# Altium schematic symbol library Altium_Library.SchLib: 822 symbols (part 12 of 17)
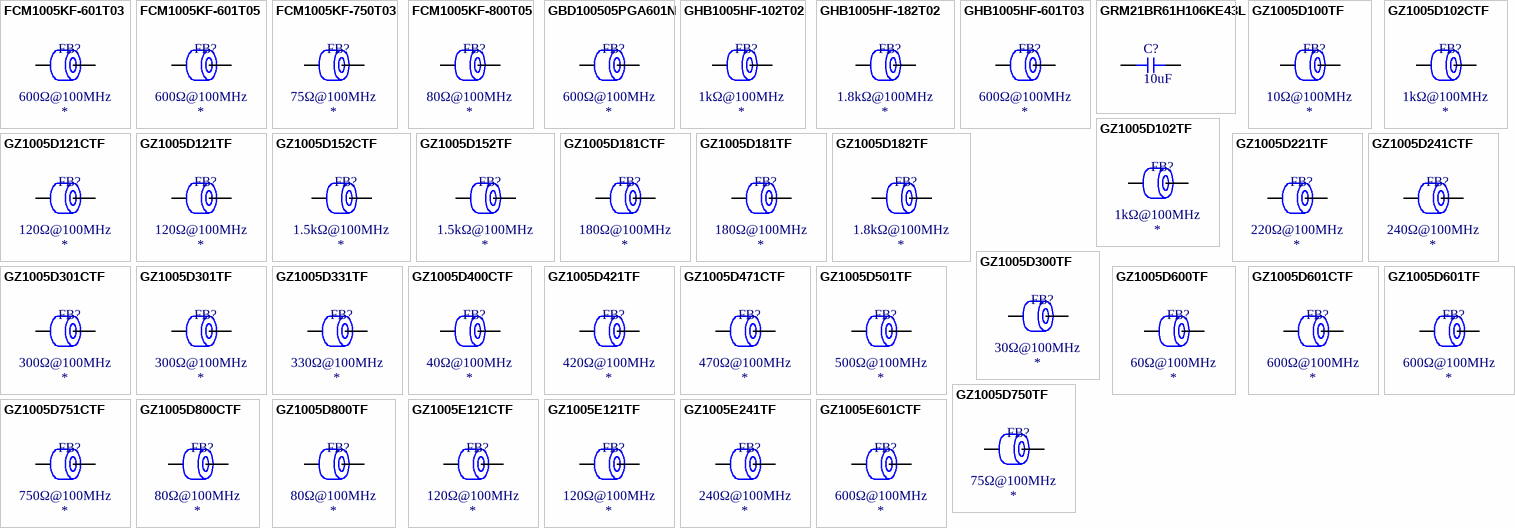
[diagram p31: symbols FCM1005KF-601T03 to GZ1005E601CTF]

## GZ1005D102TF
designator FB?  Impedance @ Frequency: 1kΩ@100MHz
Ferrite, 1kΩ@100MHz, ±25%, 1.2Ω, 100mA, SMD 0402; Manufacturer: Sunlord; Manufacturer Part Number: GZ1005D102TF; Package Size: 0402; JLCPCB Basic Part: No; JLCPCB Part Number: C32472; Supplier 1: LCSC; Category: Ferrite Beads; Supplier Part Number 1: C32472; Tolerance: ±25%; Rated Current: 100mA; DC Resistance: 1.2Ω; RoHS: Yes; ComponentLink1Description: Datasheet; ComponentLink1URL: https://wmsc.lcsc.com/wmsc/upload/file/pdf/v2/lcsc/2310301640_Sunlord-GZ1005D102TF_C32472.pdf; ComponentLink2Description: JLCPCB Part URL; ComponentLink2URL: https://jlcpcb.com/partdetail/C32472; ComponentLink3Description: LCSC Part URL; ComponentLink3URL: https://lcsc.com/product-detail/Ferrite-Beads_Sunlord-Sunlord-GZ1005D102TF_C32472.html
footprint FB-0402 (0402 (1005M) Ferrite)
pins: 1, 2

## GZ1005D121CTF
designator FB?  Impedance @ Frequency: 120Ω@100MHz
Ferrite, 120Ω@100MHz, ±25%, 180mΩ, 400mA, SMD 0402; Manufacturer: Sunlord; Manufacturer Part Number: GZ1005D121CTF; Package Size: 0402; JLCPCB Basic Part: No; JLCPCB Part Number: C92620; Supplier 1: LCSC; Category: Ferrite Beads; Supplier Part Number 1: C92620; Tolerance: ±25%; Rated Current: 400mA; DC Resistance: 180mΩ; RoHS: Yes; ComponentLink1Description: Datasheet; ComponentLink1URL: https://wmsc.lcsc.com/wmsc/upload/file/pdf/v2/lcsc/2310301640_Sunlord-GZ1005D121CTF_C92620.pdf; ComponentLink2Description: JLCPCB Part URL; ComponentLink2URL: https://jlcpcb.com/partdetail/C92620; ComponentLink3Description: LCSC Part URL; ComponentLink3URL: https://lcsc.com/product-detail/Ferrite-Beads_Sunlord-Sunlord-GZ1005D121CTF_C92620.html
footprint FB-0402 (0402 (1005M) Ferrite)
pins: 1, 2

## GZ1005D121TF
designator FB?  Impedance @ Frequency: 120Ω@100MHz
Ferrite, 120Ω@100MHz, ±25%, 400mΩ, 200mA, SMD 0402; Manufacturer: Sunlord; Manufacturer Part Number: GZ1005D121TF; Package Size: 0402; JLCPCB Basic Part: No; JLCPCB Part Number: C38480; Supplier 1: LCSC; Category: Ferrite Beads; Supplier Part Number 1: C38480; Tolerance: ±25%; Rated Current: 200mA; DC Resistance: 400mΩ; RoHS: Yes; ComponentLink1Description: Datasheet; ComponentLink1URL: https://wmsc.lcsc.com/wmsc/upload/file/pdf/v2/lcsc/2310301640_Sunlord-GZ1005D121TF_C38480.pdf; ComponentLink2Description: JLCPCB Part URL; ComponentLink2URL: https://jlcpcb.com/partdetail/C38480; ComponentLink3Description: LCSC Part URL; ComponentLink3URL: https://lcsc.com/product-detail/Ferrite-Beads_Sunlord-Sunlord-GZ1005D121TF_C38480.html
footprint FB-0402 (0402 (1005M) Ferrite)
pins: 1, 2

## GZ1005D152CTF
designator FB?  Impedance @ Frequency: 1.5kΩ@100MHz
Ferrite, 1.5kΩ@100MHz, ±25%, 1.15Ω, 100mA, SMD 0402; Manufacturer: Sunlord; Manufacturer Part Number: GZ1005D152CTF; Package Size: 0402; JLCPCB Basic Part: No; JLCPCB Part Number: C96680; Supplier 1: LCSC; Category: Ferrite Beads; Supplier Part Number 1: C96680; Tolerance: ±25%; Rated Current: 100mA; DC Resistance: 1.15Ω; RoHS: Yes; ComponentLink1Description: Datasheet; ComponentLink1URL: https://wmsc.lcsc.com/wmsc/upload/file/pdf/v2/lcsc/2310301640_Sunlord-GZ1005D152CTF_C96680.pdf; ComponentLink2Description: JLCPCB Part URL; ComponentLink2URL: https://jlcpcb.com/partdetail/C96680; ComponentLink3Description: LCSC Part URL; ComponentLink3URL: https://lcsc.com/product-detail/Ferrite-Beads_Sunlord-Sunlord-GZ1005D152CTF_C96680.html
footprint FB-0402 (0402 (1005M) Ferrite)
pins: 1, 2

## GZ1005D152TF
designator FB?  Impedance @ Frequency: 1.5kΩ@100MHz
Ferrite, 1.5kΩ@100MHz, ±25%, 1.6Ω, 100mA, SMD 0402; Manufacturer: Sunlord; Manufacturer Part Number: GZ1005D152TF; Package Size: 0402; JLCPCB Basic Part: No; JLCPCB Part Number: C89920; Supplier 1: LCSC; Category: Ferrite Beads; Supplier Part Number 1: C89920; Tolerance: ±25%; Rated Current: 100mA; DC Resistance: 1.6Ω; RoHS: Yes; ComponentLink1Description: Datasheet; ComponentLink1URL: https://wmsc.lcsc.com/wmsc/upload/file/pdf/v2/lcsc/2310301640_Sunlord-GZ1005D152TF_C89920.pdf; ComponentLink2Description: JLCPCB Part URL; ComponentLink2URL: https://jlcpcb.com/partdetail/C89920; ComponentLink3Description: LCSC Part URL; ComponentLink3URL: https://lcsc.com/product-detail/Ferrite-Beads_Sunlord-Sunlord-GZ1005D152TF_C89920.html
footprint FB-0402 (0402 (1005M) Ferrite)
pins: 1, 2

## GZ1005D181CTF
designator FB?  Impedance @ Frequency: 180Ω@100MHz
Ferrite, 180Ω@100MHz, ±25%, SMD 0402; Manufacturer: Sunlord; Manufacturer Part Number: GZ1005D181CTF; Package Size: 0402; JLCPCB Basic Part: No; JLCPCB Part Number: C919150; Supplier 1: LCSC; Category: Ferrite Beads; Supplier Part Number 1: C919150; Tolerance: ±25%; RoHS: Yes; ComponentLink1Description: Datasheet; ComponentLink1URL: https://wmsc.lcsc.com/wmsc/upload/file/pdf/v2/lcsc/2310301640_Sunlord-GZ1005D181CTF_C919150.pdf; ComponentLink2Description: JLCPCB Part URL; ComponentLink2URL: https://jlcpcb.com/partdetail/C919150; ComponentLink3Description: LCSC Part URL; ComponentLink3URL: https://lcsc.com/product-detail/Ferrite-Beads_Sunlord-Sunlord-GZ1005D181CTF_C919150.html
footprint FB-0402 (0402 (1005M) Ferrite)
pins: 1, 2

## GZ1005D181TF
designator FB?  Impedance @ Frequency: 180Ω@100MHz
Ferrite, 180Ω@100MHz, ±25%, SMD 0402; Manufacturer: Sunlord; Manufacturer Part Number: GZ1005D181TF; Package Size: 0402; JLCPCB Basic Part: No; JLCPCB Part Number: C279757; Supplier 1: LCSC; Category: Ferrite Beads; Supplier Part Number 1: C279757; Tolerance: ±25%; RoHS: Yes; ComponentLink1Description: Datasheet; ComponentLink1URL: https://wmsc.lcsc.com/wmsc/upload/file/pdf/v2/lcsc/2310301640_Sunlord-GZ1005D181TF_C279757.pdf; ComponentLink2Description: JLCPCB Part URL; ComponentLink2URL: https://jlcpcb.com/partdetail/C279757; ComponentLink3Description: LCSC Part URL; ComponentLink3URL: https://lcsc.com/product-detail/Ferrite-Beads_Sunlord-Sunlord-GZ1005D181TF_C279757.html
footprint FB-0402 (0402 (1005M) Ferrite)
pins: 1, 2

## GZ1005D182TF
designator FB?  Impedance @ Frequency: 1.8kΩ@100MHz
Ferrite, 1.8kΩ@100MHz, ±25%, 2Ω, 50mA, SMD 0402; Manufacturer: Sunlord; Manufacturer Part Number: GZ1005D182TF; Package Size: 0402; JLCPCB Basic Part: No; JLCPCB Part Number: C279974; Supplier 1: LCSC; Category: Ferrite Beads; Supplier Part Number 1: C279974; Tolerance: ±25%; Rated Current: 50mA; DC Resistance: 2Ω; RoHS: Yes; ComponentLink1Description: Datasheet; ComponentLink1URL: https://wmsc.lcsc.com/wmsc/upload/file/pdf/v2/lcsc/2310301640_Sunlord-GZ1005D182TF_C279974.pdf; ComponentLink2Description: JLCPCB Part URL; ComponentLink2URL: https://jlcpcb.com/partdetail/C279974; ComponentLink3Description: LCSC Part URL; ComponentLink3URL: https://lcsc.com/product-detail/Ferrite-Beads_Sunlord-Sunlord-GZ1005D182TF_C279974.html
footprint FB-0402 (0402 (1005M) Ferrite)
pins: 1, 2

## GZ1005D221TF
designator FB?  Impedance @ Frequency: 220Ω@100MHz
Ferrite, 220Ω@100MHz, ±25%, 450mΩ, 150mA, SMD 0402; Manufacturer: Sunlord; Manufacturer Part Number: GZ1005D221TF; Package Size: 0402; JLCPCB Basic Part: No; JLCPCB Part Number: C89919; Supplier 1: LCSC; Category: Ferrite Beads; Supplier Part Number 1: C89919; Tolerance: ±25%; Rated Current: 150mA; DC Resistance: 450mΩ; RoHS: Yes; ComponentLink1Description: Datasheet; ComponentLink1URL: https://wmsc.lcsc.com/wmsc/upload/file/pdf/v2/lcsc/2310301640_Sunlord-GZ1005D221TF_C89919.pdf; ComponentLink2Description: JLCPCB Part URL; ComponentLink2URL: https://jlcpcb.com/partdetail/C89919; ComponentLink3Description: LCSC Part URL; ComponentLink3URL: https://lcsc.com/product-detail/Ferrite-Beads_Sunlord-Sunlord-GZ1005D221TF_C89919.html
footprint FB-0402 (0402 (1005M) Ferrite)
pins: 1, 2

## GZ1005D241CTF
designator FB?  Impedance @ Frequency: 240Ω@100MHz
Ferrite, 240Ω@100MHz, ±25%, 300mΩ, 300mA, SMD 0402; Manufacturer: Sunlord; Manufacturer Part Number: GZ1005D241CTF; Package Size: 0402; JLCPCB Basic Part: No; JLCPCB Part Number: C92626; Supplier 1: LCSC; Category: Ferrite Beads; Supplier Part Number 1: C92626; Tolerance: ±25%; Rated Current: 300mA; DC Resistance: 300mΩ; RoHS: Yes; ComponentLink1Description: Datasheet; ComponentLink1URL: https://wmsc.lcsc.com/wmsc/upload/file/pdf/v2/lcsc/2310301640_Sunlord-GZ1005D241CTF_C92626.pdf; ComponentLink2Description: JLCPCB Part URL; ComponentLink2URL: https://jlcpcb.com/partdetail/C92626; ComponentLink3Description: LCSC Part URL; ComponentLink3URL: https://lcsc.com/product-detail/Ferrite-Beads_Sunlord-Sunlord-GZ1005D241CTF_C92626.html
footprint FB-0402 (0402 (1005M) Ferrite)
pins: 1, 2

## GZ1005D300TF
designator FB?  Impedance @ Frequency: 30Ω@100MHz
Ferrite, 30Ω@100MHz, ±25%, SMD 0402; Manufacturer: Sunlord; Manufacturer Part Number: GZ1005D300TF; Package Size: 0402; JLCPCB Basic Part: No; JLCPCB Part Number: C89918; Supplier 1: LCSC; Category: Ferrite Beads; Supplier Part Number 1: C89918; Tolerance: ±25%; RoHS: Yes; ComponentLink1Description: Datasheet; ComponentLink1URL: https://wmsc.lcsc.com/wmsc/upload/file/pdf/v2/lcsc/2310301640_Sunlord-GZ1005D300TF_C89918.pdf; ComponentLink2Description: JLCPCB Part URL; ComponentLink2URL: https://jlcpcb.com/partdetail/C89918; ComponentLink3Description: LCSC Part URL; ComponentLink3URL: https://lcsc.com/product-detail/Ferrite-Beads_Sunlord-Sunlord-GZ1005D300TF_C89918.html
footprint FB-0402 (0402 (1005M) Ferrite)
pins: 1, 2

## GZ1005D301CTF
designator FB?  Impedance @ Frequency: 300Ω@100MHz
Ferrite, 300Ω@100MHz, ±25%, 380mΩ, 250mA, SMD 0402; Manufacturer: Sunlord; Manufacturer Part Number: GZ1005D301CTF; Package Size: 0402; JLCPCB Basic Part: No; JLCPCB Part Number: C92623; Supplier 1: LCSC; Category: Ferrite Beads; Supplier Part Number 1: C92623; Tolerance: ±25%; Rated Current: 250mA; DC Resistance: 380mΩ; RoHS: Yes; ComponentLink1Description: Datasheet; ComponentLink1URL: https://wmsc.lcsc.com/wmsc/upload/file/pdf/v2/lcsc/2310301640_Sunlord-GZ1005D301CTF_C92623.pdf; ComponentLink2Description: JLCPCB Part URL; ComponentLink2URL: https://jlcpcb.com/partdetail/C92623; ComponentLink3Description: LCSC Part URL; ComponentLink3URL: https://lcsc.com/product-detail/Ferrite-Beads_Sunlord-Sunlord-GZ1005D301CTF_C92623.html
footprint FB-0402 (0402 (1005M) Ferrite)
pins: 1, 2

## GZ1005D301TF
designator FB?  Impedance @ Frequency: 300Ω@100MHz
Ferrite, 300Ω@100MHz, ±25%, 500mΩ, 100mA, SMD 0402; Manufacturer: Sunlord; Manufacturer Part Number: GZ1005D301TF; Package Size: 0402; JLCPCB Basic Part: No; JLCPCB Part Number: C96681; Supplier 1: LCSC; Category: Ferrite Beads; Supplier Part Number 1: C96681; Tolerance: ±25%; Rated Current: 100mA; DC Resistance: 500mΩ; RoHS: Yes; ComponentLink1Description: Datasheet; ComponentLink1URL: https://wmsc.lcsc.com/wmsc/upload/file/pdf/v2/lcsc/2310301640_Sunlord-GZ1005D301TF_C96681.pdf; ComponentLink2Description: JLCPCB Part URL; ComponentLink2URL: https://jlcpcb.com/partdetail/C96681; ComponentLink3Description: LCSC Part URL; ComponentLink3URL: https://lcsc.com/product-detail/Ferrite-Beads_Sunlord-Sunlord-GZ1005D301TF_C96681.html
footprint FB-0402 (0402 (1005M) Ferrite)
pins: 1, 2

## GZ1005D331TF
designator FB?  Impedance @ Frequency: 330Ω@100MHz
Ferrite, 330Ω@100MHz, ±25%, SMD 0402; Manufacturer: Sunlord; Manufacturer Part Number: GZ1005D331TF; Package Size: 0402; JLCPCB Basic Part: No; JLCPCB Part Number: C74324; Supplier 1: LCSC; Category: Ferrite Beads; Supplier Part Number 1: C74324; Tolerance: ±25%; RoHS: Yes; ComponentLink1Description: Datasheet; ComponentLink1URL: https://wmsc.lcsc.com/wmsc/upload/file/pdf/v2/lcsc/2310301640_Sunlord-GZ1005D331TF_C74324.pdf; ComponentLink2Description: JLCPCB Part URL; ComponentLink2URL: https://jlcpcb.com/partdetail/C74324; ComponentLink3Description: LCSC Part URL; ComponentLink3URL: https://lcsc.com/product-detail/Ferrite-Beads_Sunlord-Sunlord-GZ1005D331TF_C74324.html
footprint FB-0402 (0402 (1005M) Ferrite)
pins: 1, 2

## GZ1005D400CTF
designator FB?  Impedance @ Frequency: 40Ω@100MHz
Ferrite, 40Ω@100MHz, ±25%, 120mΩ, 550mA, SMD 0402; Manufacturer: Sunlord; Manufacturer Part Number: GZ1005D400CTF; Package Size: 0402; JLCPCB Basic Part: No; JLCPCB Part Number: C361549; Supplier 1: LCSC; Category: Ferrite Beads; Supplier Part Number 1: C361549; Tolerance: ±25%; Rated Current: 550mA; DC Resistance: 120mΩ; RoHS: Yes; ComponentLink1Description: Datasheet; ComponentLink1URL: https://wmsc.lcsc.com/wmsc/upload/file/pdf/v2/lcsc/2310301640_Sunlord-GZ1005D400CTF_C361549.pdf; ComponentLink2Description: JLCPCB Part URL; ComponentLink2URL: https://jlcpcb.com/partdetail/C361549; ComponentLink3Description: LCSC Part URL; ComponentLink3URL: https://lcsc.com/product-detail/Ferrite-Beads_Sunlord-Sunlord-GZ1005D400CTF_C361549.html
footprint FB-0402 (0402 (1005M) Ferrite)
pins: 1, 2

## GZ1005D421TF
designator FB?  Impedance @ Frequency: 420Ω@100MHz
Ferrite, 420Ω@100MHz, ±25%, 600mΩ, 100mA, SMD 0402; Manufacturer: Sunlord; Manufacturer Part Number: GZ1005D421TF; Package Size: 0402; JLCPCB Basic Part: No; JLCPCB Part Number: C361512; Supplier 1: LCSC; Category: Ferrite Beads; Supplier Part Number 1: C361512; Tolerance: ±25%; Rated Current: 100mA; DC Resistance: 600mΩ; RoHS: Yes; ComponentLink1Description: Datasheet; ComponentLink1URL: https://wmsc.lcsc.com/wmsc/upload/file/pdf/v2/lcsc/2310301640_Sunlord-GZ1005D421TF_C361512.pdf; ComponentLink2Description: JLCPCB Part URL; ComponentLink2URL: https://jlcpcb.com/partdetail/C361512; ComponentLink3Description: LCSC Part URL; ComponentLink3URL: https://lcsc.com/product-detail/Ferrite-Beads_Sunlord-Sunlord-GZ1005D421TF_C361512.html
footprint FB-0402 (0402 (1005M) Ferrite)
pins: 1, 2

## GZ1005D471CTF
designator FB?  Impedance @ Frequency: 470Ω@100MHz
Ferrite, 470Ω@100MHz, ±25%, 450mΩ, 250mA, SMD 0402; Manufacturer: Sunlord; Manufacturer Part Number: GZ1005D471CTF; Package Size: 0402; JLCPCB Basic Part: No; JLCPCB Part Number: C316428; Supplier 1: LCSC; Category: Ferrite Beads; Supplier Part Number 1: C316428; Tolerance: ±25%; Rated Current: 250mA; DC Resistance: 450mΩ; RoHS: Yes; ComponentLink1Description: Datasheet; ComponentLink1URL: https://wmsc.lcsc.com/wmsc/upload/file/pdf/v2/lcsc/2310301640_Sunlord-GZ1005D471CTF_C316428.pdf; ComponentLink2Description: JLCPCB Part URL; ComponentLink2URL: https://jlcpcb.com/partdetail/C316428; ComponentLink3Description: LCSC Part URL; ComponentLink3URL: https://lcsc.com/product-detail/Ferrite-Beads_Sunlord-Sunlord-GZ1005D471CTF_C316428.html
footprint FB-0402 (0402 (1005M) Ferrite)
pins: 1, 2

## GZ1005D501TF
designator FB?  Impedance @ Frequency: 500Ω@100MHz
Ferrite, 500Ω@100MHz, ±25%, 800mΩ, 100mA, SMD 0402; Manufacturer: Sunlord; Manufacturer Part Number: GZ1005D501TF; Package Size: 0402; JLCPCB Basic Part: No; JLCPCB Part Number: C96683; Supplier 1: LCSC; Category: Ferrite Beads; Supplier Part Number 1: C96683; Tolerance: ±25%; Rated Current: 100mA; DC Resistance: 800mΩ; RoHS: Yes; ComponentLink1Description: Datasheet; ComponentLink1URL: https://wmsc.lcsc.com/wmsc/upload/file/pdf/v2/lcsc/2310301640_Sunlord-GZ1005D501TF_C96683.pdf; ComponentLink2Description: JLCPCB Part URL; ComponentLink2URL: https://jlcpcb.com/partdetail/C96683; ComponentLink3Description: LCSC Part URL; ComponentLink3URL: https://lcsc.com/product-detail/Ferrite-Beads_Sunlord-Sunlord-GZ1005D501TF_C96683.html
footprint FB-0402 (0402 (1005M) Ferrite)
pins: 1, 2

## GZ1005D600TF
designator FB?  Impedance @ Frequency: 60Ω@100MHz
Ferrite, 60Ω@100MHz, ±25%, 300mΩ, 200mA, SMD 0402; Manufacturer: Sunlord; Manufacturer Part Number: GZ1005D600TF; Package Size: 0402; JLCPCB Basic Part: No; JLCPCB Part Number: C23478; Supplier 1: LCSC; Category: Ferrite Beads; Supplier Part Number 1: C23478; Tolerance: ±25%; Rated Current: 200mA; DC Resistance: 300mΩ; RoHS: Yes; ComponentLink1Description: Datasheet; ComponentLink1URL: https://wmsc.lcsc.com/wmsc/upload/file/pdf/v2/lcsc/2310301640_Sunlord-GZ1005D600TF_C23478.pdf; ComponentLink2Description: JLCPCB Part URL; ComponentLink2URL: https://jlcpcb.com/partdetail/C23478; ComponentLink3Description: LCSC Part URL; ComponentLink3URL: https://lcsc.com/product-detail/Ferrite-Beads_Sunlord-Sunlord-GZ1005D600TF_C23478.html
footprint FB-0402 (0402 (1005M) Ferrite)
pins: 1, 2

## GZ1005D601CTF
designator FB?  Impedance @ Frequency: 600Ω@100MHz
Ferrite, 600Ω@100MHz, ±25%, 500mΩ, 250mA, SMD 0402; Manufacturer: Sunlord; Manufacturer Part Number: GZ1005D601CTF; Package Size: 0402; JLCPCB Basic Part: No; JLCPCB Part Number: C92621; Supplier 1: LCSC; Category: Ferrite Beads; Supplier Part Number 1: C92621; Tolerance: ±25%; Rated Current: 250mA; DC Resistance: 500mΩ; RoHS: Yes; ComponentLink1Description: Datasheet; ComponentLink1URL: https://wmsc.lcsc.com/wmsc/upload/file/pdf/v2/lcsc/2310301640_Sunlord-GZ1005D601CTF_C92621.pdf; ComponentLink2Description: JLCPCB Part URL; ComponentLink2URL: https://jlcpcb.com/partdetail/C92621; ComponentLink3Description: LCSC Part URL; ComponentLink3URL: https://lcsc.com/product-detail/Ferrite-Beads_Sunlord-Sunlord-GZ1005D601CTF_C92621.html
footprint FB-0402 (0402 (1005M) Ferrite)
pins: 1, 2

## GZ1005D601TF
designator FB?  Impedance @ Frequency: 600Ω@100MHz
Ferrite, 600Ω@100MHz, ±25%, 900mΩ, 100mA, SMD 0402; Manufacturer: Sunlord; Manufacturer Part Number: GZ1005D601TF; Package Size: 0402; JLCPCB Basic Part: No; JLCPCB Part Number: C14182; Supplier 1: LCSC; Category: Ferrite Beads; Supplier Part Number 1: C14182; Tolerance: ±25%; Rated Current: 100mA; DC Resistance: 900mΩ; RoHS: Yes; ComponentLink1Description: Datasheet; ComponentLink1URL: https://wmsc.lcsc.com/wmsc/upload/file/pdf/v2/lcsc/2310301640_Sunlord-GZ1005D601TF_C14182.pdf; ComponentLink2Description: JLCPCB Part URL; ComponentLink2URL: https://jlcpcb.com/partdetail/C14182; ComponentLink3Description: LCSC Part URL; ComponentLink3URL: https://lcsc.com/product-detail/Ferrite-Beads_Sunlord-Sunlord-GZ1005D601TF_C14182.html
footprint FB-0402 (0402 (1005M) Ferrite)
pins: 1, 2

## GZ1005D750TF
designator FB?  Impedance @ Frequency: 75Ω@100MHz
Ferrite, 75Ω@100MHz, ±25%, SMD 0402; Manufacturer: Sunlord; Manufacturer Part Number: GZ1005D750TF; Package Size: 0402; JLCPCB Basic Part: No; JLCPCB Part Number: C279668; Supplier 1: LCSC; Category: Ferrite Beads; Supplier Part Number 1: C279668; Tolerance: ±25%; RoHS: Yes; ComponentLink1Description: Datasheet; ComponentLink1URL: https://wmsc.lcsc.com/wmsc/upload/file/pdf/v2/lcsc/2310301640_Sunlord-GZ1005D750TF_C279668.pdf; ComponentLink2Description: JLCPCB Part URL; ComponentLink2URL: https://jlcpcb.com/partdetail/C279668; ComponentLink3Description: LCSC Part URL; ComponentLink3URL: https://lcsc.com/product-detail/Ferrite-Beads_Sunlord-Sunlord-GZ1005D750TF_C279668.html
footprint FB-0402 (0402 (1005M) Ferrite)
pins: 1, 2

## GZ1005D751CTF
designator FB?  Impedance @ Frequency: 750Ω@100MHz
Ferrite, 750Ω@100MHz, ±25%, 650mΩ, 150mA, SMD 0402; Manufacturer: Sunlord; Manufacturer Part Number: GZ1005D751CTF; Package Size: 0402; JLCPCB Basic Part: No; JLCPCB Part Number: C98269; Supplier 1: LCSC; Category: Ferrite Beads; Supplier Part Number 1: C98269; Tolerance: ±25%; Rated Current: 150mA; DC Resistance: 650mΩ; RoHS: Yes; ComponentLink1Description: Datasheet; ComponentLink1URL: https://wmsc.lcsc.com/wmsc/upload/file/pdf/v2/lcsc/2310301640_Sunlord-GZ1005D751CTF_C98269.pdf; ComponentLink2Description: JLCPCB Part URL; ComponentLink2URL: https://jlcpcb.com/partdetail/C98269; ComponentLink3Description: LCSC Part URL; ComponentLink3URL: https://lcsc.com/product-detail/Ferrite-Beads_Sunlord-Sunlord-GZ1005D751CTF_C98269.html
footprint FB-0402 (0402 (1005M) Ferrite)
pins: 1, 2

## GZ1005D800CTF
designator FB?  Impedance @ Frequency: 80Ω@100MHz
Ferrite, 80Ω@100MHz, ±25%, 160mΩ, 450mA, SMD 0402; Manufacturer: Sunlord; Manufacturer Part Number: GZ1005D800CTF; Package Size: 0402; JLCPCB Basic Part: No; JLCPCB Part Number: C361550; Supplier 1: LCSC; Category: Ferrite Beads; Supplier Part Number 1: C361550; Tolerance: ±25%; Rated Current: 450mA; DC Resistance: 160mΩ; RoHS: Yes; ComponentLink1Description: Datasheet; ComponentLink1URL: https://wmsc.lcsc.com/wmsc/upload/file/pdf/v2/lcsc/2310301640_Sunlord-GZ1005D800CTF_C361550.pdf; ComponentLink2Description: JLCPCB Part URL; ComponentLink2URL: https://jlcpcb.com/partdetail/C361550; ComponentLink3Description: LCSC Part URL; ComponentLink3URL: https://lcsc.com/product-detail/Ferrite-Beads_Sunlord-Sunlord-GZ1005D800CTF_C361550.html
footprint FB-0402 (0402 (1005M) Ferrite)
pins: 1, 2

## GZ1005D800TF
designator FB?  Impedance @ Frequency: 80Ω@100MHz
Ferrite, 80Ω@100MHz, ±25%, 350mΩ, 200mA, SMD 0402; Manufacturer: Sunlord; Manufacturer Part Number: GZ1005D800TF; Package Size: 0402; JLCPCB Basic Part: No; JLCPCB Part Number: C96685; Supplier 1: LCSC; Category: Ferrite Beads; Supplier Part Number 1: C96685; Tolerance: ±25%; Rated Current: 200mA; DC Resistance: 350mΩ; RoHS: Yes; ComponentLink1Description: Datasheet; ComponentLink1URL: https://wmsc.lcsc.com/wmsc/upload/file/pdf/v2/lcsc/2310301640_Sunlord-GZ1005D800TF_C96685.pdf; ComponentLink2Description: JLCPCB Part URL; ComponentLink2URL: https://jlcpcb.com/partdetail/C96685; ComponentLink3Description: LCSC Part URL; ComponentLink3URL: https://lcsc.com/product-detail/Ferrite-Beads_Sunlord-Sunlord-GZ1005D800TF_C96685.html
footprint FB-0402 (0402 (1005M) Ferrite)
pins: 1, 2

## GZ1005E121CTF
designator FB?  Impedance @ Frequency: 120Ω@100MHz
Ferrite, 120Ω@100MHz, ±25%, 250mΩ, 500mA, SMD 0402; Manufacturer: Sunlord; Manufacturer Part Number: GZ1005E121CTF; Package Size: 0402; JLCPCB Basic Part: No; JLCPCB Part Number: C361554; Supplier 1: LCSC; Category: Ferrite Beads; Supplier Part Number 1: C361554; Tolerance: ±25%; Rated Current: 500mA; DC Resistance: 250mΩ; RoHS: Yes; ComponentLink1Description: Datasheet; ComponentLink1URL: https://wmsc.lcsc.com/wmsc/upload/file/pdf/v2/lcsc/2310301640_Sunlord-GZ1005E121CTF_C361554.pdf; ComponentLink2Description: JLCPCB Part URL; ComponentLink2URL: https://jlcpcb.com/partdetail/C361554; ComponentLink3Description: LCSC Part URL; ComponentLink3URL: https://lcsc.com/product-detail/Ferrite-Beads_Sunlord-Sunlord-GZ1005E121CTF_C361554.html
footprint FB-0402 (0402 (1005M) Ferrite)
pins: 1, 2

## GZ1005E121TF
designator FB?  Impedance @ Frequency: 120Ω@100MHz
Ferrite, 120Ω@100MHz, ±25%, 400mΩ, 200mA, SMD 0402; Manufacturer: Sunlord; Manufacturer Part Number: GZ1005E121TF; Package Size: 0402; JLCPCB Basic Part: No; JLCPCB Part Number: C361514; Supplier 1: LCSC; Category: Ferrite Beads; Supplier Part Number 1: C361514; Tolerance: ±25%; Rated Current: 200mA; DC Resistance: 400mΩ; RoHS: Yes; ComponentLink1Description: Datasheet; ComponentLink1URL: https://wmsc.lcsc.com/wmsc/upload/file/pdf/v2/lcsc/2310301640_Sunlord-GZ1005E121TF_C361514.pdf; ComponentLink2Description: JLCPCB Part URL; ComponentLink2URL: https://jlcpcb.com/partdetail/C361514; ComponentLink3Description: LCSC Part URL; ComponentLink3URL: https://lcsc.com/product-detail/Ferrite-Beads_Sunlord-Sunlord-GZ1005E121TF_C361514.html
footprint FB-0402 (0402 (1005M) Ferrite)
pins: 1, 2

## GZ1005E241TF
designator FB?  Impedance @ Frequency: 240Ω@100MHz
Ferrite, 240Ω@100MHz, ±25%, 500mΩ, 200mA, SMD 0402; Manufacturer: Sunlord; Manufacturer Part Number: GZ1005E241TF; Package Size: 0402; JLCPCB Basic Part: No; JLCPCB Part Number: C279864; Supplier 1: LCSC; Category: Ferrite Beads; Supplier Part Number 1: C279864; Tolerance: ±25%; Rated Current: 200mA; DC Resistance: 500mΩ; RoHS: Yes; ComponentLink1Description: Datasheet; ComponentLink1URL: https://wmsc.lcsc.com/wmsc/upload/file/pdf/v2/lcsc/2310301640_Sunlord-GZ1005E241TF_C279864.pdf; ComponentLink2Description: JLCPCB Part URL; ComponentLink2URL: https://jlcpcb.com/partdetail/C279864; ComponentLink3Description: LCSC Part URL; ComponentLink3URL: https://lcsc.com/product-detail/Ferrite-Beads_Sunlord-Sunlord-GZ1005E241TF_C279864.html
footprint FB-0402 (0402 (1005M) Ferrite)
pins: 1, 2

## GZ1005E601CTF
designator FB?  Impedance @ Frequency: 600Ω@100MHz
Ferrite, 600Ω@100MHz, ±25%, 600mΩ, 300mA, SMD 0402; Manufacturer: Sunlord; Manufacturer Part Number: GZ1005E601CTF; Package Size: 0402; JLCPCB Basic Part: No; JLCPCB Part Number: C361555; Supplier 1: LCSC; Category: Ferrite Beads; Supplier Part Number 1: C361555; Tolerance: ±25%; Rated Current: 300mA; DC Resistance: 600mΩ; RoHS: Yes; ComponentLink1Description: Datasheet; ComponentLink1URL: https://wmsc.lcsc.com/wmsc/upload/file/pdf/v2/lcsc/2310301640_Sunlord-GZ1005E601CTF_C361555.pdf; ComponentLink2Description: JLCPCB Part URL; ComponentLink2URL: https://jlcpcb.com/partdetail/C361555; ComponentLink3Description: LCSC Part URL; ComponentLink3URL: https://lcsc.com/product-detail/Ferrite-Beads_Sunlord-Sunlord-GZ1005E601CTF_C361555.html
footprint FB-0402 (0402 (1005M) Ferrite)
pins: 1, 2

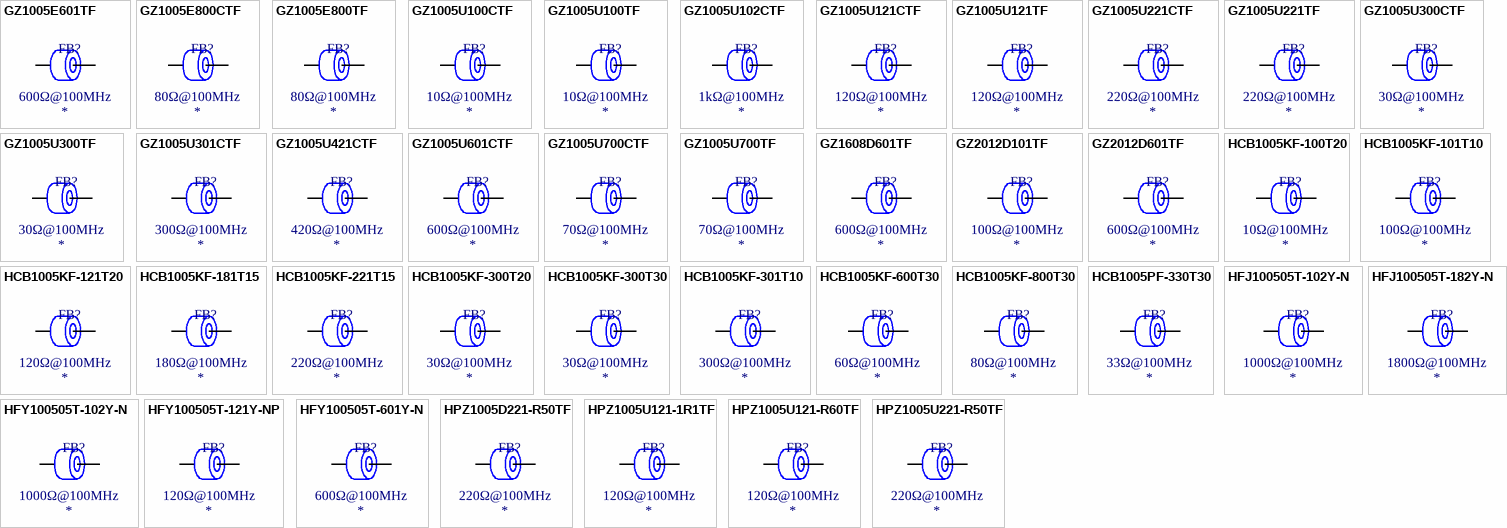
[diagram p14: symbols GZ1005E601TF to HPZ1005U221-R50TF]

## GZ1005E601TF
designator FB?  Impedance @ Frequency: 600Ω@100MHz
Ferrite, 600Ω@100MHz, ±25%, 900mΩ, 100mA, SMD 0402; Manufacturer: Sunlord; Manufacturer Part Number: GZ1005E601TF; Package Size: 0402; JLCPCB Basic Part: No; JLCPCB Part Number: C98261; Supplier 1: LCSC; Category: Ferrite Beads; Supplier Part Number 1: C98261; Tolerance: ±25%; Rated Current: 100mA; DC Resistance: 900mΩ; RoHS: Yes; ComponentLink1Description: Datasheet; ComponentLink1URL: https://wmsc.lcsc.com/wmsc/upload/file/pdf/v2/lcsc/2310301640_Sunlord-GZ1005E601TF_C98261.pdf; ComponentLink2Description: JLCPCB Part URL; ComponentLink2URL: https://jlcpcb.com/partdetail/C98261; ComponentLink3Description: LCSC Part URL; ComponentLink3URL: https://lcsc.com/product-detail/Ferrite-Beads_Sunlord-Sunlord-GZ1005E601TF_C98261.html
footprint FB-0402 (0402 (1005M) Ferrite)
pins: 1, 2

## GZ1005E800CTF
designator FB?  Impedance @ Frequency: 80Ω@100MHz
Ferrite, 80Ω@100MHz, ±25%, 200mΩ, 500mA, SMD 0402; Manufacturer: Sunlord; Manufacturer Part Number: GZ1005E800CTF; Package Size: 0402; JLCPCB Basic Part: No; JLCPCB Part Number: C361553; Supplier 1: LCSC; Category: Ferrite Beads; Supplier Part Number 1: C361553; Tolerance: ±25%; Rated Current: 500mA; DC Resistance: 200mΩ; RoHS: Yes; ComponentLink1Description: Datasheet; ComponentLink1URL: https://wmsc.lcsc.com/wmsc/upload/file/pdf/v2/lcsc/2310301640_Sunlord-GZ1005E800CTF_C361553.pdf; ComponentLink2Description: JLCPCB Part URL; ComponentLink2URL: https://jlcpcb.com/partdetail/C361553; ComponentLink3Description: LCSC Part URL; ComponentLink3URL: https://lcsc.com/product-detail/Ferrite-Beads_Sunlord-Sunlord-GZ1005E800CTF_C361553.html
footprint FB-0402 (0402 (1005M) Ferrite)
pins: 1, 2

## GZ1005E800TF
designator FB?  Impedance @ Frequency: 80Ω@100MHz
Ferrite, 80Ω@100MHz, ±25%, 350mΩ, 200mA, SMD 0402; Manufacturer: Sunlord; Manufacturer Part Number: GZ1005E800TF; Package Size: 0402; JLCPCB Basic Part: No; JLCPCB Part Number: C361513; Supplier 1: LCSC; Category: Ferrite Beads; Supplier Part Number 1: C361513; Tolerance: ±25%; Rated Current: 200mA; DC Resistance: 350mΩ; RoHS: Yes; ComponentLink1Description: Datasheet; ComponentLink1URL: https://wmsc.lcsc.com/wmsc/upload/file/pdf/v2/lcsc/2310301640_Sunlord-GZ1005E800TF_C361513.pdf; ComponentLink2Description: JLCPCB Part URL; ComponentLink2URL: https://jlcpcb.com/partdetail/C361513; ComponentLink3Description: LCSC Part URL; ComponentLink3URL: https://lcsc.com/product-detail/Ferrite-Beads_Sunlord-Sunlord-GZ1005E800TF_C361513.html
footprint FB-0402 (0402 (1005M) Ferrite)
pins: 1, 2

## GZ1005U100CTF
designator FB?  Impedance @ Frequency: 10Ω@100MHz
Ferrite, 10Ω@100MHz, 30mΩ, 1A, SMD 0402; Manufacturer: Sunlord; Manufacturer Part Number: GZ1005U100CTF; Package Size: 0402; JLCPCB Basic Part: No; JLCPCB Part Number: C96686; Supplier 1: LCSC; Category: Ferrite Beads; Supplier Part Number 1: C96686; Rated Current: 1A; DC Resistance: 30mΩ; RoHS: Yes; ComponentLink1Description: Datasheet; ComponentLink1URL: https://wmsc.lcsc.com/wmsc/upload/file/pdf/v2/lcsc/2310301640_Sunlord-GZ1005U100CTF_C96686.pdf; ComponentLink2Description: JLCPCB Part URL; ComponentLink2URL: https://jlcpcb.com/partdetail/C96686; ComponentLink3Description: LCSC Part URL; ComponentLink3URL: https://lcsc.com/product-detail/Ferrite-Beads_Sunlord-Sunlord-GZ1005U100CTF_C96686.html
footprint FB-0402 (0402 (1005M) Ferrite)
pins: 1, 2

## GZ1005U100TF
designator FB?  Impedance @ Frequency: 10Ω@100MHz
Ferrite, 10Ω@100MHz, 50mΩ, 500mA, SMD 0402; Manufacturer: Sunlord; Manufacturer Part Number: GZ1005U100TF; Package Size: 0402; JLCPCB Basic Part: No; JLCPCB Part Number: C279964; Supplier 1: LCSC; Category: Ferrite Beads; Supplier Part Number 1: C279964; Rated Current: 500mA; DC Resistance: 50mΩ; RoHS: Yes; ComponentLink1Description: Datasheet; ComponentLink1URL: https://wmsc.lcsc.com/wmsc/upload/file/pdf/v2/lcsc/2310301640_Sunlord-GZ1005U100TF_C279964.pdf; ComponentLink2Description: JLCPCB Part URL; ComponentLink2URL: https://jlcpcb.com/partdetail/C279964; ComponentLink3Description: LCSC Part URL; ComponentLink3URL: https://lcsc.com/product-detail/Ferrite-Beads_Sunlord-Sunlord-GZ1005U100TF_C279964.html
footprint FB-0402 (0402 (1005M) Ferrite)
pins: 1, 2

## GZ1005U102CTF
designator FB?  Impedance @ Frequency: 1kΩ@100MHz
Ferrite, 1kΩ@100MHz, ±25%, 580mΩ, 300mA, SMD 0402; Manufacturer: Sunlord; Manufacturer Part Number: GZ1005U102CTF; Package Size: 0402; JLCPCB Basic Part: No; JLCPCB Part Number: C96687; Supplier 1: LCSC; Category: Ferrite Beads; Supplier Part Number 1: C96687; Tolerance: ±25%; Rated Current: 300mA; DC Resistance: 580mΩ; RoHS: Yes; ComponentLink1Description: Datasheet; ComponentLink1URL: https://wmsc.lcsc.com/wmsc/upload/file/pdf/v2/lcsc/2310301640_Sunlord-GZ1005U102CTF_C96687.pdf; ComponentLink2Description: JLCPCB Part URL; ComponentLink2URL: https://jlcpcb.com/partdetail/C96687; ComponentLink3Description: LCSC Part URL; ComponentLink3URL: https://lcsc.com/product-detail/Ferrite-Beads_Sunlord-Sunlord-GZ1005U102CTF_C96687.html
footprint FB-0402 (0402 (1005M) Ferrite)
pins: 1, 2

## GZ1005U121CTF
designator FB?  Impedance @ Frequency: 120Ω@100MHz
Ferrite, 120Ω@100MHz, ±25%, 200mΩ, 500mA, SMD 0402; Manufacturer: Sunlord; Manufacturer Part Number: GZ1005U121CTF; Package Size: 0402; JLCPCB Basic Part: No; JLCPCB Part Number: C96688; Supplier 1: LCSC; Category: Ferrite Beads; Supplier Part Number 1: C96688; Tolerance: ±25%; Rated Current: 500mA; DC Resistance: 200mΩ; RoHS: Yes; ComponentLink1Description: Datasheet; ComponentLink1URL: https://wmsc.lcsc.com/wmsc/upload/file/pdf/v2/lcsc/2310301640_Sunlord-GZ1005U121CTF_C96688.pdf; ComponentLink2Description: JLCPCB Part URL; ComponentLink2URL: https://jlcpcb.com/partdetail/C96688; ComponentLink3Description: LCSC Part URL; ComponentLink3URL: https://lcsc.com/product-detail/Ferrite-Beads_Sunlord-Sunlord-GZ1005U121CTF_C96688.html
footprint FB-0402 (0402 (1005M) Ferrite)
pins: 1, 2

## GZ1005U121TF
designator FB?  Impedance @ Frequency: 120Ω@100MHz
Ferrite, 120Ω@100MHz, ±25%, 400mΩ, 200mA, SMD 0402; Manufacturer: Sunlord; Manufacturer Part Number: GZ1005U121TF; Package Size: 0402; JLCPCB Basic Part: No; JLCPCB Part Number: C361515; Supplier 1: LCSC; Category: Ferrite Beads; Supplier Part Number 1: C361515; Tolerance: ±25%; Rated Current: 200mA; DC Resistance: 400mΩ; RoHS: Yes; ComponentLink1Description: Datasheet; ComponentLink1URL: https://wmsc.lcsc.com/wmsc/upload/file/pdf/v2/lcsc/2310301640_Sunlord-GZ1005U121TF_C361515.pdf; ComponentLink2Description: JLCPCB Part URL; ComponentLink2URL: https://jlcpcb.com/partdetail/C361515; ComponentLink3Description: LCSC Part URL; ComponentLink3URL: https://lcsc.com/product-detail/Ferrite-Beads_Sunlord-Sunlord-GZ1005U121TF_C361515.html
footprint FB-0402 (0402 (1005M) Ferrite)
pins: 1, 2

## GZ1005U221CTF
designator FB?  Impedance @ Frequency: 220Ω@100MHz
Ferrite, 220Ω@100MHz, ±25%, 300mΩ, 400mA, SMD 0402; Manufacturer: Sunlord; Manufacturer Part Number: GZ1005U221CTF; Package Size: 0402; JLCPCB Basic Part: No; JLCPCB Part Number: C92625; Supplier 1: LCSC; Category: Ferrite Beads; Supplier Part Number 1: C92625; Tolerance: ±25%; Rated Current: 400mA; DC Resistance: 300mΩ; RoHS: Yes; ComponentLink1Description: Datasheet; ComponentLink1URL: https://wmsc.lcsc.com/wmsc/upload/file/pdf/v2/lcsc/2310301640_Sunlord-GZ1005U221CTF_C92625.pdf; ComponentLink2Description: JLCPCB Part URL; ComponentLink2URL: https://jlcpcb.com/partdetail/C92625; ComponentLink3Description: LCSC Part URL; ComponentLink3URL: https://lcsc.com/product-detail/Ferrite-Beads_Sunlord-Sunlord-GZ1005U221CTF_C92625.html
footprint FB-0402 (0402 (1005M) Ferrite)
pins: 1, 2

## GZ1005U221TF
designator FB?  Impedance @ Frequency: 220Ω@100MHz
Ferrite, 220Ω@100MHz, ±25%, 500mΩ, 100mA, SMD 0402; Manufacturer: Sunlord; Manufacturer Part Number: GZ1005U221TF; Package Size: 0402; JLCPCB Basic Part: No; JLCPCB Part Number: C98263; Supplier 1: LCSC; Category: Ferrite Beads; Supplier Part Number 1: C98263; Tolerance: ±25%; Rated Current: 100mA; DC Resistance: 500mΩ; RoHS: Yes; ComponentLink1Description: Datasheet; ComponentLink1URL: https://wmsc.lcsc.com/wmsc/upload/file/pdf/v2/lcsc/2310301640_Sunlord-GZ1005U221TF_C98263.pdf; ComponentLink2Description: JLCPCB Part URL; ComponentLink2URL: https://jlcpcb.com/partdetail/C98263; ComponentLink3Description: LCSC Part URL; ComponentLink3URL: https://lcsc.com/product-detail/Ferrite-Beads_Sunlord-Sunlord-GZ1005U221TF_C98263.html
footprint FB-0402 (0402 (1005M) Ferrite)
pins: 1, 2

## GZ1005U300CTF
designator FB?  Impedance @ Frequency: 30Ω@100MHz
Ferrite, 30Ω@100MHz, ±25%, 60mΩ, 700mA, SMD 0402; Manufacturer: Sunlord; Manufacturer Part Number: GZ1005U300CTF; Package Size: 0402; JLCPCB Basic Part: No; JLCPCB Part Number: C96689; Supplier 1: LCSC; Category: Ferrite Beads; Supplier Part Number 1: C96689; Tolerance: ±25%; Rated Current: 700mA; DC Resistance: 60mΩ; RoHS: Yes; ComponentLink1Description: Datasheet; ComponentLink1URL: https://wmsc.lcsc.com/wmsc/upload/file/pdf/v2/lcsc/2310301640_Sunlord-GZ1005U300CTF_C96689.pdf; ComponentLink2Description: JLCPCB Part URL; ComponentLink2URL: https://jlcpcb.com/partdetail/C96689; ComponentLink3Description: LCSC Part URL; ComponentLink3URL: https://lcsc.com/product-detail/Ferrite-Beads_Sunlord-Sunlord-GZ1005U300CTF_C96689.html
footprint FB-0402 (0402 (1005M) Ferrite)
pins: 1, 2

## GZ1005U300TF
designator FB?  Impedance @ Frequency: 30Ω@100MHz
Ferrite, 30Ω@100MHz, ±25%, 200mΩ, 300mA, SMD 0402; Manufacturer: Sunlord; Manufacturer Part Number: GZ1005U300TF; Package Size: 0402; JLCPCB Basic Part: No; JLCPCB Part Number: C98262; Supplier 1: LCSC; Category: Ferrite Beads; Supplier Part Number 1: C98262; Tolerance: ±25%; Rated Current: 300mA; DC Resistance: 200mΩ; RoHS: Yes; ComponentLink1Description: Datasheet; ComponentLink1URL: https://wmsc.lcsc.com/wmsc/upload/file/pdf/v2/lcsc/2310301640_Sunlord-GZ1005U300TF_C98262.pdf; ComponentLink2Description: JLCPCB Part URL; ComponentLink2URL: https://jlcpcb.com/partdetail/C98262; ComponentLink3Description: LCSC Part URL; ComponentLink3URL: https://lcsc.com/product-detail/Ferrite-Beads_Sunlord-Sunlord-GZ1005U300TF_C98262.html
footprint FB-0402 (0402 (1005M) Ferrite)
pins: 1, 2

## GZ1005U301CTF
designator FB?  Impedance @ Frequency: 300Ω@100MHz
Ferrite, 300Ω@100MHz, ±25%, 500mΩ, 300mA, SMD 0402; Manufacturer: Sunlord; Manufacturer Part Number: GZ1005U301CTF; Package Size: 0402; JLCPCB Basic Part: No; JLCPCB Part Number: C96690; Supplier 1: LCSC; Category: Ferrite Beads; Supplier Part Number 1: C96690; Tolerance: ±25%; Rated Current: 300mA; DC Resistance: 500mΩ; RoHS: Yes; ComponentLink1Description: Datasheet; ComponentLink1URL: https://wmsc.lcsc.com/wmsc/upload/file/pdf/v2/lcsc/2310301640_Sunlord-GZ1005U301CTF_C96690.pdf; ComponentLink2Description: JLCPCB Part URL; ComponentLink2URL: https://jlcpcb.com/partdetail/C96690; ComponentLink3Description: LCSC Part URL; ComponentLink3URL: https://lcsc.com/product-detail/Ferrite-Beads_Sunlord-Sunlord-GZ1005U301CTF_C96690.html
footprint FB-0402 (0402 (1005M) Ferrite)
pins: 1, 2

## GZ1005U421CTF
designator FB?  Impedance @ Frequency: 420Ω@100MHz
Ferrite, 420Ω@100MHz, ±25%, 520mΩ, 300mA, SMD 0402; Manufacturer: Sunlord; Manufacturer Part Number: GZ1005U421CTF; Package Size: 0402; JLCPCB Basic Part: No; JLCPCB Part Number: C361556; Supplier 1: LCSC; Category: Ferrite Beads; Supplier Part Number 1: C361556; Tolerance: ±25%; Rated Current: 300mA; DC Resistance: 520mΩ; RoHS: Yes; ComponentLink1Description: Datasheet; ComponentLink1URL: https://wmsc.lcsc.com/wmsc/upload/file/pdf/v2/lcsc/2310301640_Sunlord-GZ1005U421CTF_C361556.pdf; ComponentLink2Description: JLCPCB Part URL; ComponentLink2URL: https://jlcpcb.com/partdetail/C361556; ComponentLink3Description: LCSC Part URL; ComponentLink3URL: https://lcsc.com/product-detail/Ferrite-Beads_Sunlord-Sunlord-GZ1005U421CTF_C361556.html
footprint FB-0402 (0402 (1005M) Ferrite)
pins: 1, 2

## GZ1005U601CTF
designator FB?  Impedance @ Frequency: 600Ω@100MHz
Ferrite, 600Ω@100MHz, ±25%, 550mΩ, 300mA, SMD 0402; Manufacturer: Sunlord; Manufacturer Part Number: GZ1005U601CTF; Package Size: 0402; JLCPCB Basic Part: No; JLCPCB Part Number: C96691; Supplier 1: LCSC; Category: Ferrite Beads; Supplier Part Number 1: C96691; Tolerance: ±25%; Rated Current: 300mA; DC Resistance: 550mΩ; RoHS: Yes; ComponentLink1Description: Datasheet; ComponentLink1URL: https://wmsc.lcsc.com/wmsc/upload/file/pdf/v2/lcsc/2310301640_Sunlord-GZ1005U601CTF_C96691.pdf; ComponentLink2Description: JLCPCB Part URL; ComponentLink2URL: https://jlcpcb.com/partdetail/C96691; ComponentLink3Description: LCSC Part URL; ComponentLink3URL: https://lcsc.com/product-detail/Ferrite-Beads_Sunlord-Sunlord-GZ1005U601CTF_C96691.html
footprint FB-0402 (0402 (1005M) Ferrite)
pins: 1, 2

## GZ1005U700CTF
designator FB?  Impedance @ Frequency: 70Ω@100MHz
Ferrite, 70Ω@100MHz, ±25%, 100mΩ, 700mA, SMD 0402; Manufacturer: Sunlord; Manufacturer Part Number: GZ1005U700CTF; Package Size: 0402; JLCPCB Basic Part: No; JLCPCB Part Number: C96692; Supplier 1: LCSC; Category: Ferrite Beads; Supplier Part Number 1: C96692; Tolerance: ±25%; Rated Current: 700mA; DC Resistance: 100mΩ; RoHS: Yes; ComponentLink1Description: Datasheet; ComponentLink1URL: https://wmsc.lcsc.com/wmsc/upload/file/pdf/v2/lcsc/2310301640_Sunlord-GZ1005U700CTF_C96692.pdf; ComponentLink2Description: JLCPCB Part URL; ComponentLink2URL: https://jlcpcb.com/partdetail/C96692; ComponentLink3Description: LCSC Part URL; ComponentLink3URL: https://lcsc.com/product-detail/Ferrite-Beads_Sunlord-Sunlord-GZ1005U700CTF_C96692.html
footprint FB-0402 (0402 (1005M) Ferrite)
pins: 1, 2

## GZ1005U700TF
designator FB?  Impedance @ Frequency: 70Ω@100MHz
Ferrite, 70Ω@100MHz, ±25%, 300mΩ, 200mA, SMD 0402; Manufacturer: Sunlord; Manufacturer Part Number: GZ1005U700TF; Package Size: 0402; JLCPCB Basic Part: No; JLCPCB Part Number: C60113; Supplier 1: LCSC; Category: Ferrite Beads; Supplier Part Number 1: C60113; Tolerance: ±25%; Rated Current: 200mA; DC Resistance: 300mΩ; RoHS: Yes; ComponentLink1Description: Datasheet; ComponentLink1URL: https://wmsc.lcsc.com/wmsc/upload/file/pdf/v2/lcsc/2310301640_Sunlord-GZ1005U700TF_C60113.pdf; ComponentLink2Description: JLCPCB Part URL; ComponentLink2URL: https://jlcpcb.com/partdetail/C60113; ComponentLink3Description: LCSC Part URL; ComponentLink3URL: https://lcsc.com/product-detail/Ferrite-Beads_Sunlord-Sunlord-GZ1005U700TF_C60113.html
footprint FB-0402 (0402 (1005M) Ferrite)
pins: 1, 2

## GZ1608D601TF
designator FB?  Impedance @ Frequency: 600Ω@100MHz
Ferrite, 600Ω@100MHz, ±25%, 450mΩ, 200mA, SMD 0603; Manufacturer: Sunlord; Manufacturer Part Number: GZ1608D601TF; Package Size: 0603; JLCPCB Basic Part: Yes; JLCPCB Part Number: C1002; Supplier 1: LCSC; Category: Ferrite Beads; Supplier Part Number 1: C1002; Tolerance: ±25%; Rated Current: 200mA; DC Resistance: 450mΩ; RoHS: Yes; ComponentLink1Description: Datasheet; ComponentLink1URL: https://wmsc.lcsc.com/wmsc/upload/file/pdf/v2/lcsc/2310301640_Sunlord-GZ1608D601TF_C1002.pdf; ComponentLink2Description: JLCPCB Part URL; ComponentLink2URL: https://jlcpcb.com/partdetail/C1002; ComponentLink3Description: LCSC Part URL; ComponentLink3URL: https://lcsc.com/product-detail/Ferrite-Beads_Sunlord-Sunlord-GZ1608D601TF_C1002.html
footprint FB-0603 (0603 (1608M) Ferrite)
pins: 1, 2

## GZ2012D101TF
designator FB?  Impedance @ Frequency: 100Ω@100MHz
Ferrite, 100Ω@100MHz, ±25%, 800mA, SMD 0805; Manufacturer: Sunlord; Manufacturer Part Number: GZ2012D101TF; Package Size: 0805; JLCPCB Basic Part: Yes; JLCPCB Part Number: C1015; Supplier 1: LCSC; Category: Ferrite Beads; Supplier Part Number 1: C1015; Tolerance: ±25%; Rated Current: 800mA; RoHS: Yes; ComponentLink1Description: Datasheet; ComponentLink1URL: https://wmsc.lcsc.com/wmsc/upload/file/pdf/v2/lcsc/2310301640_Sunlord-GZ2012D101TF_C1015.pdf; ComponentLink2Description: JLCPCB Part URL; ComponentLink2URL: https://jlcpcb.com/partdetail/C1015; ComponentLink3Description: LCSC Part URL; ComponentLink3URL: https://lcsc.com/product-detail/Ferrite-Beads_Sunlord-Sunlord-GZ2012D101TF_C1015.html
footprint FB-0805 (0805 (2012M) Ferrite)
pins: 1, 2

## GZ2012D601TF
designator FB?  Impedance @ Frequency: 600Ω@100MHz
Ferrite, 600Ω@100MHz, ±25%, 300mΩ, 500mA, SMD 0805; Manufacturer: Sunlord; Manufacturer Part Number: GZ2012D601TF; Package Size: 0805; JLCPCB Basic Part: Yes; JLCPCB Part Number: C1017; Supplier 1: LCSC; Category: Ferrite Beads; Supplier Part Number 1: C1017; Tolerance: ±25%; Rated Current: 500mA; DC Resistance: 300mΩ; RoHS: Yes; ComponentLink1Description: Datasheet; ComponentLink1URL: https://wmsc.lcsc.com/wmsc/upload/file/pdf/v2/lcsc/2310301640_Sunlord-GZ2012D601TF_C1017.pdf; ComponentLink2Description: JLCPCB Part URL; ComponentLink2URL: https://jlcpcb.com/partdetail/C1017; ComponentLink3Description: LCSC Part URL; ComponentLink3URL: https://lcsc.com/product-detail/Ferrite-Beads_Sunlord-Sunlord-GZ2012D601TF_C1017.html
footprint FB-0805 (0805 (2012M) Ferrite)
pins: 1, 2

## HCB1005KF-100T20
designator FB?  Impedance @ Frequency: 10Ω@100MHz
Ferrite, 10Ω@100MHz, ±25%, 100mΩ, 2A, SMD 0402; Manufacturer: TAI-TECH; Manufacturer Part Number: HCB1005KF-100T20; Package Size: 0402; JLCPCB Basic Part: No; JLCPCB Part Number: C356952; Supplier 1: LCSC; Category: Ferrite Beads; Supplier Part Number 1: C356952; Tolerance: ±25%; Rated Current: 2A; DC Resistance: 100mΩ; RoHS: Yes; ComponentLink1Description: Datasheet; ComponentLink1URL: https://wmsc.lcsc.com/wmsc/upload/file/pdf/v2/lcsc/2009171137_TAI-TECH-HCB1005KF-100T20_C356952.pdf; ComponentLink2Description: JLCPCB Part URL; ComponentLink2URL: https://jlcpcb.com/partdetail/C356952; ComponentLink3Description: LCSC Part URL; ComponentLink3URL: https://lcsc.com/product-detail/Ferrite-Beads_TAI-TECH-TAI-TECH-HCB1005KF-100T20_C356952.html
footprint FB-0402 (0402 (1005M) Ferrite)
pins: 1, 2

## HCB1005KF-101T10
designator FB?  Impedance @ Frequency: 100Ω@100MHz
Ferrite, 100Ω@100MHz, ±25%, 200mΩ, 1A, SMD 0402; Manufacturer: TAI-TECH; Manufacturer Part Number: HCB1005KF-101T10; Package Size: 0402; JLCPCB Basic Part: No; JLCPCB Part Number: C356953; Supplier 1: LCSC; Category: Ferrite Beads; Supplier Part Number 1: C356953; Tolerance: ±25%; Rated Current: 1A; DC Resistance: 200mΩ; RoHS: Yes; ComponentLink1Description: Datasheet; ComponentLink1URL: https://wmsc.lcsc.com/wmsc/upload/file/pdf/v2/lcsc/2009171137_TAI-TECH-HCB1005KF-101T10_C356953.pdf; ComponentLink2Description: JLCPCB Part URL; ComponentLink2URL: https://jlcpcb.com/partdetail/C356953; ComponentLink3Description: LCSC Part URL; ComponentLink3URL: https://lcsc.com/product-detail/Ferrite-Beads_TAI-TECH-TAI-TECH-HCB1005KF-101T10_C356953.html
footprint FB-0402 (0402 (1005M) Ferrite)
pins: 1, 2

## HCB1005KF-121T20
designator FB?  Impedance @ Frequency: 120Ω@100MHz
Ferrite, 120Ω@100MHz, ±25%, 95mΩ, 2A, SMD 0402; Manufacturer: TAI-TECH; Manufacturer Part Number: HCB1005KF-121T20; Package Size: 0402; JLCPCB Basic Part: No; JLCPCB Part Number: C141722; Supplier 1: LCSC; Category: Ferrite Beads; Supplier Part Number 1: C141722; Tolerance: ±25%; Rated Current: 2A; DC Resistance: 95mΩ; RoHS: Yes; ComponentLink1Description: Datasheet; ComponentLink1URL: https://wmsc.lcsc.com/wmsc/upload/file/pdf/v2/lcsc/2009171304_TAI-TECH-HCB1005KF-121T20_C141722.pdf; ComponentLink2Description: JLCPCB Part URL; ComponentLink2URL: https://jlcpcb.com/partdetail/C141722; ComponentLink3Description: LCSC Part URL; ComponentLink3URL: https://lcsc.com/product-detail/Ferrite-Beads_TAI-TECH-TAI-TECH-HCB1005KF-121T20_C141722.html
footprint FB-0402 (0402 (1005M) Ferrite)
pins: 1, 2

## HCB1005KF-181T15
designator FB?  Impedance @ Frequency: 180Ω@100MHz
Ferrite, 180Ω@100MHz, ±25%, 150mΩ, 150mA, SMD 0402; Manufacturer: TAI-TECH; Manufacturer Part Number: HCB1005KF-181T15; Package Size: 0402; JLCPCB Basic Part: No; JLCPCB Part Number: C356955; Supplier 1: LCSC; Category: Ferrite Beads; Supplier Part Number 1: C356955; Tolerance: ±25%; Rated Current: 150mA; DC Resistance: 150mΩ; RoHS: Yes; ComponentLink1Description: Datasheet; ComponentLink1URL: https://wmsc.lcsc.com/wmsc/upload/file/pdf/v2/lcsc/2109061830_TAI-TECH-HCB1005KF-181T15_C356955.pdf; ComponentLink2Description: JLCPCB Part URL; ComponentLink2URL: https://jlcpcb.com/partdetail/C356955; ComponentLink3Description: LCSC Part URL; ComponentLink3URL: https://lcsc.com/product-detail/Ferrite-Beads_TAI-TECH-TAI-TECH-HCB1005KF-181T15_C356955.html
footprint FB-0402 (0402 (1005M) Ferrite)
pins: 1, 2

## HCB1005KF-221T15
designator FB?  Impedance @ Frequency: 220Ω@100MHz
Ferrite, 220Ω@100MHz, ±25%, 150mΩ, 1.5A, SMD 0402; Manufacturer: TAI-TECH; Manufacturer Part Number: HCB1005KF-221T15; Package Size: 0402; JLCPCB Basic Part: No; JLCPCB Part Number: C155102; Supplier 1: LCSC; Category: Ferrite Beads; Supplier Part Number 1: C155102; Tolerance: ±25%; Rated Current: 1.5A; DC Resistance: 150mΩ; RoHS: Yes; ComponentLink1Description: Datasheet; ComponentLink1URL: https://wmsc.lcsc.com/wmsc/upload/file/pdf/v2/lcsc/2009171335_TAI-TECH-HCB1005KF-221T15_C155102.pdf; ComponentLink2Description: JLCPCB Part URL; ComponentLink2URL: https://jlcpcb.com/partdetail/C155102; ComponentLink3Description: LCSC Part URL; ComponentLink3URL: https://lcsc.com/product-detail/Ferrite-Beads_TAI-TECH-TAI-TECH-HCB1005KF-221T15_C155102.html
footprint FB-0402 (0402 (1005M) Ferrite)
pins: 1, 2

## HCB1005KF-300T20
designator FB?  Impedance @ Frequency: 30Ω@100MHz
Ferrite, 30Ω@100MHz, ±25%, 100mΩ, 2A, SMD 0402; Manufacturer: TAI-TECH; Manufacturer Part Number: HCB1005KF-300T20; Package Size: 0402; JLCPCB Basic Part: No; JLCPCB Part Number: C369509; Supplier 1: LCSC; Category: Ferrite Beads; Supplier Part Number 1: C369509; Tolerance: ±25%; Rated Current: 2A; DC Resistance: 100mΩ; RoHS: Yes; ComponentLink1Description: Datasheet; ComponentLink1URL: https://wmsc.lcsc.com/wmsc/upload/file/pdf/v2/lcsc/2009171441_TAI-TECH-HCB1005KF-300T20_C369509.pdf; ComponentLink2Description: JLCPCB Part URL; ComponentLink2URL: https://jlcpcb.com/partdetail/C369509; ComponentLink3Description: LCSC Part URL; ComponentLink3URL: https://lcsc.com/product-detail/Ferrite-Beads_TAI-TECH-TAI-TECH-HCB1005KF-300T20_C369509.html
footprint FB-0402 (0402 (1005M) Ferrite)
pins: 1, 2

## HCB1005KF-300T30
designator FB?  Impedance @ Frequency: 30Ω@100MHz
Ferrite, 30Ω@100MHz, ±25%, 40mΩ, 3A, SMD 0402; Manufacturer: TAI-TECH; Manufacturer Part Number: HCB1005KF-300T30; Package Size: 0402; JLCPCB Basic Part: No; JLCPCB Part Number: C356956; Supplier 1: LCSC; Category: Ferrite Beads; Supplier Part Number 1: C356956; Tolerance: ±25%; Rated Current: 3A; DC Resistance: 40mΩ; RoHS: Yes; ComponentLink1Description: Datasheet; ComponentLink1URL: https://wmsc.lcsc.com/wmsc/upload/file/pdf/v2/lcsc/2009171137_TAI-TECH-HCB1005KF-300T30_C356956.pdf; ComponentLink2Description: JLCPCB Part URL; ComponentLink2URL: https://jlcpcb.com/partdetail/C356956; ComponentLink3Description: LCSC Part URL; ComponentLink3URL: https://lcsc.com/product-detail/Ferrite-Beads_TAI-TECH-TAI-TECH-HCB1005KF-300T30_C356956.html
footprint FB-0402 (0402 (1005M) Ferrite)
pins: 1, 2

## HCB1005KF-301T10
designator FB?  Impedance @ Frequency: 300Ω@100MHz
Ferrite, 300Ω@100MHz, ±25%, 200mΩ, 1A, SMD 0402; Manufacturer: TAI-TECH; Manufacturer Part Number: HCB1005KF-301T10; Package Size: 0402; JLCPCB Basic Part: No; JLCPCB Part Number: C356957; Supplier 1: LCSC; Category: Ferrite Beads; Supplier Part Number 1: C356957; Tolerance: ±25%; Rated Current: 1A; DC Resistance: 200mΩ; RoHS: Yes; ComponentLink1Description: Datasheet; ComponentLink1URL: https://wmsc.lcsc.com/wmsc/upload/file/pdf/v2/lcsc/2009171137_TAI-TECH-HCB1005KF-301T10_C356957.pdf; ComponentLink2Description: JLCPCB Part URL; ComponentLink2URL: https://jlcpcb.com/partdetail/C356957; ComponentLink3Description: LCSC Part URL; ComponentLink3URL: https://lcsc.com/product-detail/Ferrite-Beads_TAI-TECH-TAI-TECH-HCB1005KF-301T10_C356957.html
footprint FB-0402 (0402 (1005M) Ferrite)
pins: 1, 2

## HCB1005KF-600T30
designator FB?  Impedance @ Frequency: 60Ω@100MHz
Ferrite, 60Ω@100MHz, ±25%, 40mΩ, 3A, SMD 0402; Manufacturer: TAI-TECH; Manufacturer Part Number: HCB1005KF-600T30; Package Size: 0402; JLCPCB Basic Part: No; JLCPCB Part Number: C356960; Supplier 1: LCSC; Category: Ferrite Beads; Supplier Part Number 1: C356960; Tolerance: ±25%; Rated Current: 3A; DC Resistance: 40mΩ; RoHS: Yes; ComponentLink1Description: Datasheet; ComponentLink1URL: https://wmsc.lcsc.com/wmsc/upload/file/pdf/v2/lcsc/2009171138_TAI-TECH-HCB1005KF-600T30_C356960.pdf; ComponentLink2Description: JLCPCB Part URL; ComponentLink2URL: https://jlcpcb.com/partdetail/C356960; ComponentLink3Description: LCSC Part URL; ComponentLink3URL: https://lcsc.com/product-detail/Ferrite-Beads_TAI-TECH-TAI-TECH-HCB1005KF-600T30_C356960.html
footprint FB-0402 (0402 (1005M) Ferrite)
pins: 1, 2